# Altium schematic symbol library 53047-0310.SchLib: 1 symbol
Pins are listed as number, name and electrical type; pins without a type are passive.

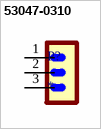
[diagram p0: symbol 53047-0310]

## 53047-0310
designator P?
Connector Header Through Hole 3 position 0.049 (1.25mm); MF: Molex; MP: 53047-0310; Package: None; Price: None; Value: *; SnapEDA_Link: https://www.snapeda.com/parts/53047-0310/Molex/view-part/?ref=snap; Availability: In Stock; Check_prices: https://www.snapeda.com/parts/53047-0310/Molex/view-part/?ref=eda
footprint 53047-0310
pins: 1, 2, 3